# EAGLE library part RASPBERRY-PI+ (library HansAva)
Samtec SSW-120-01-T-D
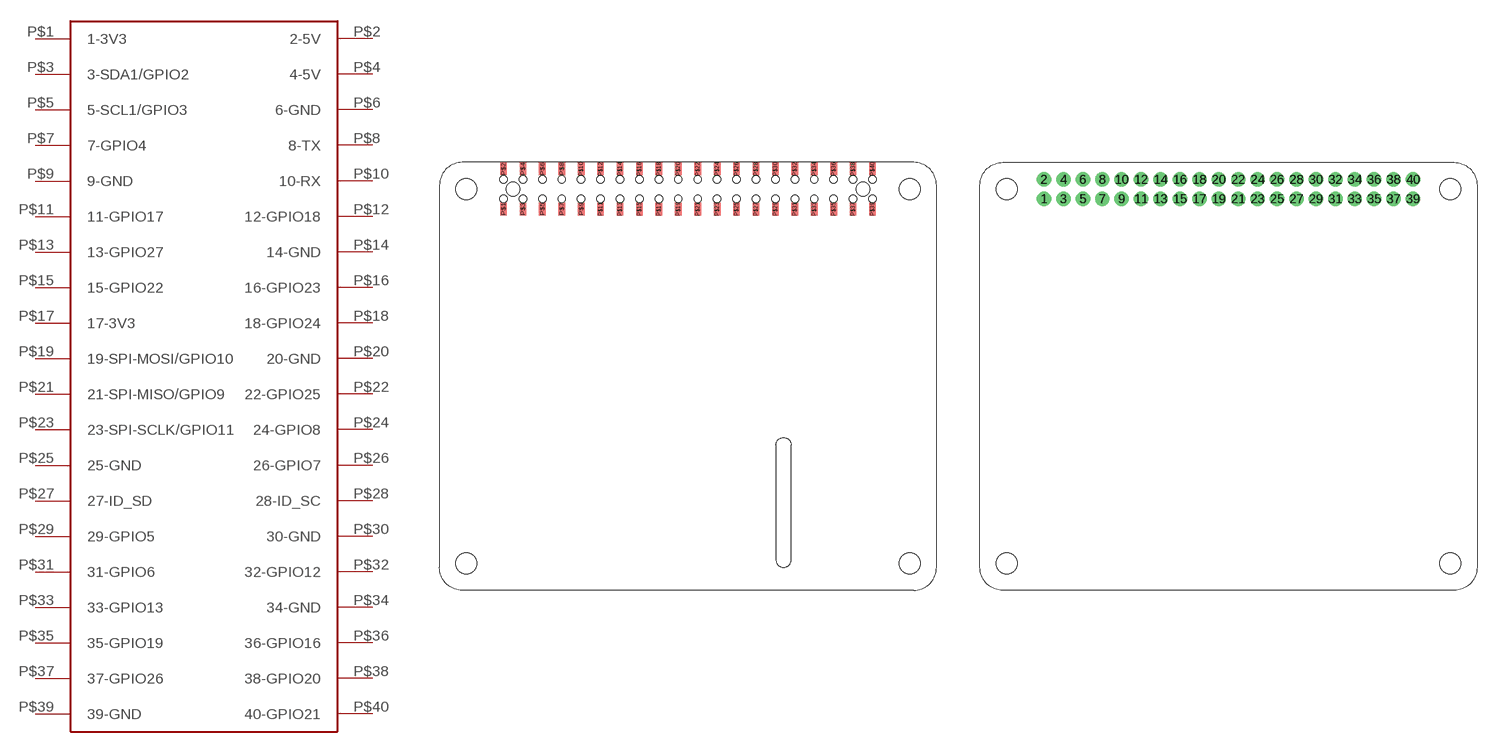
[diagram p40: symbol with the pads of RASPBERRY-PI-PLUS-CAM_NOTCH; footprints RASPBERRY-PI-PLUS-CAM_NOTCH, RASPBERRY-PI-PLUS]

Designator prefix -

## RASPBERRY-PI+  [RASPBERRY-PI-PLUS-CAM_NOTCH]
P$1  1-3V3
P$2  2-5V
P$3  3-SDA1/GPIO2
P$4  4-5V
P$5  5-SCL1/GPIO3
P$6  6-GND
P$7  7-GPIO4
P$8  8-TX
P$9  9-GND
P$10  10-RX
P$11  11-GPIO17
P$12  12-GPIO18
P$13  13-GPIO27
P$14  14-GND
P$15  15-GPIO22
P$16  16-GPIO23
P$17  17-3V3
P$18  18-GPIO24
P$19  19-SPI-MOSI/GPIO10
P$20  20-GND
P$21  21-SPI-MISO/GPIO9
P$22  22-GPIO25
P$23  23-SPI-SCLK/GPIO11
P$24  24-GPIO8
P$25  25-GND
P$26  26-GPIO7
P$27  27-ID_SD
P$28  28-ID_SC
P$29  29-GPIO5
P$30  30-GND
P$31  31-GPIO6
P$32  32-GPIO12
P$33  33-GPIO13
P$34  34-GND
P$35  35-GPIO19
P$36  36-GPIO16
P$37  37-GPIO26
P$38  38-GPIO20
P$39  39-GND
P$40  40-GPIO21

## RASPBERRY-PI+NONOTCHES  [RASPBERRY-PI-PLUS]
1  1-3V3
2  2-5V
3  3-SDA1/GPIO2
4  4-5V
5  5-SCL1/GPIO3
6  6-GND
7  7-GPIO4
8  8-TX
9  9-GND
10  10-RX
11  11-GPIO17
12  12-GPIO18
13  13-GPIO27
14  14-GND
15  15-GPIO22
16  16-GPIO23
17  17-3V3
18  18-GPIO24
19  19-SPI-MOSI/GPIO10
20  20-GND
21  21-SPI-MISO/GPIO9
22  22-GPIO25
23  23-SPI-SCLK/GPIO11
24  24-GPIO8
25  25-GND
26  26-GPIO7
27  27-ID_SD
28  28-ID_SC
29  29-GPIO5
30  30-GND
31  31-GPIO6
32  32-GPIO12
33  33-GPIO13
34  34-GND
35  35-GPIO19
36  36-GPIO16
37  37-GPIO26
38  38-GPIO20
39  39-GND
40  40-GPIO21

## RASPBERRY-PI+CAM/DISPLAY_NOTCH  [RASPBERRY-PI-PLUS-DISPLAY/CAM_NOTCH]
Pads as for RASPBERRY-PI-PLUS-CAM_NOTCH

## RASPBERRY-PI+RASPBERRY-PI-PLUS-NOOUTLINE  [RASPBERRY-PI-PLUS-NOOUTLINE]
Pads as for RASPBERRY-PI-PLUS

## RASPBERRY-PI+HEADERONLY  [RASPBERRY-PI-PLUS-HEADERONLY]
Pads as for RASPBERRY-PI-PLUS

## RASPBERRY-PI+PIZERO  [RASPBERRY-PI-ZERO]
Pads as for RASPBERRY-PI-PLUS

## RASPBERRY-PI+PIZERO-REFLOWHEADER  [RASPBERRY-PI-ZERO-REFLOWHEADER]
Pads as for RASPBERRY-PI-PLUS-CAM_NOTCH

## Footprint RASPBERRY-PI-PLUS-CAM_NOTCH (pad centres in mm)
For use with TOBY : REF-182684-02 2x20 SIF 10.00mm length PCB tails REF-182665-01 2x20 pos. with PCB alignment peg option REF-182683-02 2x20 SIF 4.93mm length PCB tails http://www.toby.co.uk/content/catalogue/products.aspx?series=REF-18xxxx-0x http://www.toby.co.uk/content/catalogue/products.aspx?series=REF-1826xx-0x http://www.toby.co.uk/content/catalogue/products.aspx?series=REF-18xxxx-0x
smd 0.889 x 1.68: P$1 -34.13,21.905; P$2 -34.13,27.145; P$3 -31.59,21.905; P$4 -31.59,27.145; P$5 -29.05,21.905; P$6 -29.05,27.145; P$7 -26.51,21.905; P$8 -26.51,27.145; P$9 -23.97,21.905; P$10 -23.97,27.145; P$11 -21.43,21.905; P$12 -21.43,27.145; P$13 -18.89,21.905; P$14 -18.89,27.145; P$15 -16.35,21.905; P$16 -16.35,27.145; P$17 -13.81,21.905; P$18 -13.81,27.145; P$19 -11.27,21.905; P$20 -11.27,27.145; P$21 -8.73,21.905; P$22 -8.73,27.145; P$23 -6.19,21.905; P$24 -6.19,27.145; P$25 -3.65,21.905; P$26 -3.65,27.145; P$27 -1.11,21.905; P$28 -1.11,27.145; P$29 1.43,21.905; P$30 1.43,27.145; P$31 3.97,21.905; P$32 3.97,27.145; P$33 6.51,21.905; P$34 6.51,27.145; P$35 9.05,21.905; P$36 9.05,27.145; P$37 11.59,21.905; P$38 11.59,27.145; P$39 14.13,21.905; P$40 14.13,27.145
hole 2.75 at -39,24.5
hole 2.75 at 19,24.5
hole 2.75 at -39,-24.5
hole 2.75 at 19,-24.5
hole 1.78 at -32.86,24.5
hole 1.78 at 12.86,24.5
hole 0.97 at -34.13,25.77
hole 0.97 at -31.59,25.77
hole 0.97 at -29.05,25.77
hole 0.97 at -26.51,25.77
hole 0.97 at -23.97,25.77
hole 0.97 at -21.43,25.77
hole 0.97 at -18.89,25.77
hole 0.97 at -16.35,25.77
hole 0.97 at -13.81,25.77
hole 0.97 at -11.27,25.77
hole 0.97 at -8.73,25.77
hole 0.97 at -6.19,25.77
hole 0.97 at -3.65,25.77
hole 0.97 at -1.11,25.77
hole 0.97 at 1.43,25.77
hole 0.97 at 3.97,25.77
hole 0.97 at 6.51,25.77
hole 0.97 at 9.05,25.77
hole 0.97 at 11.59,25.77
hole 0.97 at 14.13,25.77
hole 0.97 at -34.13,23.23
hole 0.97 at -31.59,23.23
hole 0.97 at -29.05,23.23
hole 0.97 at -26.51,23.23
hole 0.97 at -23.97,23.23
hole 0.97 at -21.43,23.23
hole 0.97 at -18.89,23.23
hole 0.97 at -16.35,23.23
hole 0.97 at -13.81,23.23
hole 0.97 at -11.27,23.23
hole 0.97 at -8.73,23.23
hole 0.97 at -6.19,23.23
hole 0.97 at -3.65,23.23
hole 0.97 at -1.11,23.23
hole 0.97 at 1.43,23.23
hole 0.97 at 3.97,23.23
hole 0.97 at 6.51,23.23
hole 0.97 at 9.05,23.23
hole 0.97 at 11.59,23.23
hole 0.97 at 14.13,23.23

## Footprint RASPBERRY-PI-PLUS (pad centres in mm)
drill 0.97 pad 1.88: 1 -34.13,23.23; 2 -34.13,25.77; 3 -31.59,23.23; 4 -31.59,25.77; 5 -29.05,23.23; 6 -29.05,25.77; 7 -26.51,23.23; 8 -26.51,25.77; 9 -23.97,23.23; 10 -23.97,25.77; 11 -21.43,23.23; 12 -21.43,25.77; 13 -18.89,23.23; 14 -18.89,25.77; 15 -16.35,23.23; 16 -16.35,25.77; 17 -13.81,23.23; 18 -13.81,25.77; 19 -11.27,23.23; 20 -11.27,25.77; 21 -8.73,23.23; 22 -8.73,25.77; 23 -6.19,23.23; 24 -6.19,25.77; 25 -3.65,23.23; 26 -3.65,25.77; 27 -1.11,23.23; 28 -1.11,25.77; 29 1.43,23.23; 30 1.43,25.77; 31 3.97,23.23; 32 3.98,25.77; 33 6.51,23.23; 34 6.51,25.77; 35 9.05,23.23; 36 9.05,25.77; 37 11.59,23.23; 38 11.59,25.77; 39 14.13,23.23; 40 14.13,25.77
hole 2.75 at -39,24.5
hole 2.75 at 19,24.5
hole 2.75 at -39,-24.5
hole 2.75 at 19,-24.5

## Footprint RASPBERRY-PI-PLUS-DISPLAY/CAM_NOTCH (pad centres in mm)
smd 0.889 x 1.68: P$1 -34.13,21.905; P$2 -34.13,27.145; P$3 -31.59,21.905; P$4 -31.59,27.145; P$5 -29.05,21.905; P$6 -29.05,27.145; P$7 -26.51,21.905; P$8 -26.51,27.145; P$9 -23.97,21.905; P$10 -23.97,27.145; P$11 -21.43,21.905; P$12 -21.43,27.145; P$13 -18.89,21.905; P$14 -18.89,27.145; P$15 -16.35,21.905; P$16 -16.35,27.145; P$17 -13.81,21.905; P$18 -13.81,27.145; P$19 -11.27,21.905; P$20 -11.27,27.145; P$21 -8.73,21.905; P$22 -8.73,27.145; P$23 -6.19,21.905; P$24 -6.19,27.145; P$25 -3.65,21.905; P$26 -3.65,27.145; P$27 -1.11,21.905; P$28 -1.11,27.145; P$29 1.43,21.905; P$30 1.43,27.145; P$31 3.97,21.905; P$32 3.97,27.145; P$33 6.51,21.905; P$34 6.51,27.145; P$35 9.05,21.905; P$36 9.05,27.145; P$37 11.59,21.905; P$38 11.59,27.145; P$39 14.13,21.905; P$40 14.13,27.145
hole 2.75 at -39,24.5
hole 2.75 at 19,24.5
hole 2.75 at -39,-24.5
hole 2.75 at 19,-24.5
hole 1.78 at -32.86,24.5
hole 1.78 at 12.86,24.5
hole 0.97 at -34.13,25.77
hole 0.97 at -31.59,25.77
hole 0.97 at -29.05,25.77
hole 0.97 at -26.51,25.77
hole 0.97 at -23.97,25.77
hole 0.97 at -21.43,25.77
hole 0.97 at -18.89,25.77
hole 0.97 at -16.35,25.77
hole 0.97 at -13.81,25.77
hole 0.97 at -11.27,25.77
hole 0.97 at -8.73,25.77
hole 0.97 at -6.19,25.77
hole 0.97 at -3.65,25.77
hole 0.97 at -1.11,25.77
hole 0.97 at 1.43,25.77
hole 0.97 at 3.97,25.77
hole 0.97 at 6.51,25.77
hole 0.97 at 9.05,25.77
hole 0.97 at 11.59,25.77
hole 0.97 at 14.13,25.77
hole 0.97 at -34.13,23.23
hole 0.97 at -31.59,23.23
hole 0.97 at -29.05,23.23
hole 0.97 at -26.51,23.23
hole 0.97 at -23.97,23.23
hole 0.97 at -21.43,23.23
hole 0.97 at -18.89,23.23
hole 0.97 at -16.35,23.23
hole 0.97 at -13.81,23.23
hole 0.97 at -11.27,23.23
hole 0.97 at -8.73,23.23
hole 0.97 at -6.19,23.23
hole 0.97 at -3.65,23.23
hole 0.97 at -1.11,23.23
hole 0.97 at 1.43,23.23
hole 0.97 at 3.97,23.23
hole 0.97 at 6.51,23.23
hole 0.97 at 9.05,23.23
hole 0.97 at 11.59,23.23
hole 0.97 at 14.13,23.23

## Footprint RASPBERRY-PI-PLUS-NOOUTLINE (pad centres in mm)
drill 0.97 pad 1.88: 1 -23.97,24.5; 2 -23.97,27.04; 3 -21.43,24.5; 4 -21.43,27.04; 5 -18.89,24.5; 6 -18.89,27.04; 7 -16.35,24.5; 8 -16.35,27.04; 9 -13.81,24.5; 10 -13.81,27.04; 11 -11.27,24.5; 12 -11.27,27.04; 13 -8.73,24.5; 14 -8.73,27.04; 15 -6.19,24.5; 16 -6.19,27.04; 17 -3.65,24.5; 18 -3.65,27.04; 19 -1.11,24.5; 20 -1.11,27.04; 21 1.43,24.5; 22 1.43,27.04; 23 3.97,24.5; 24 3.97,27.04; 25 6.51,24.5; 26 6.51,27.04; 27 9.05,24.5; 28 9.05,27.04; 29 11.59,24.5; 30 11.59,27.04; 31 14.13,24.5; 32 14.14,27.04; 33 16.67,24.5; 34 16.67,27.04; 35 19.21,24.5; 36 19.21,27.04; 37 21.75,24.5; 38 21.75,27.04; 39 24.29,24.5; 40 24.29,27.04
hole 2.75 at -28.84,25.77
hole 2.75 at 29.16,25.77
hole 2.75 at -28.84,-23.23
hole 2.75 at 29.16,-23.23

## Footprint RASPBERRY-PI-PLUS-HEADERONLY (pad centres in mm)
drill 0.97 pad 1.88: 1 -23.97,-1.218; 2 -23.97,1.323; 3 -21.43,-1.218; 4 -21.43,1.323; 5 -18.89,-1.218; 6 -18.89,1.323; 7 -16.35,-1.218; 8 -16.35,1.323; 9 -13.81,-1.218; 10 -13.81,1.323; 11 -11.27,-1.218; 12 -11.27,1.323; 13 -8.73,-1.218; 14 -8.73,1.323; 15 -6.19,-1.218; 16 -6.19,1.323; 17 -3.65,-1.218; 18 -3.65,1.323; 19 -1.11,-1.218; 20 -1.11,1.323; 21 1.43,-1.218; 22 1.43,1.323; 23 3.97,-1.218; 24 3.97,1.323; 25 6.51,-1.218; 26 6.51,1.323; 27 9.05,-1.218; 28 9.05,1.323; 29 11.59,-1.218; 30 11.59,1.323; 31 14.13,-1.218; 32 14.14,1.323; 33 16.67,-1.218; 34 16.67,1.323; 35 19.21,-1.218; 36 19.21,1.323; 37 21.75,-1.218; 38 21.75,1.323; 39 24.29,-1.218; 40 24.29,1.323

## Footprint RASPBERRY-PI-ZERO (pad centres in mm)
drill 0.97 pad 1.88: 1 -23.97,23.23; 2 -23.97,25.77; 3 -21.43,23.23; 4 -21.43,25.77; 5 -18.89,23.23; 6 -18.89,25.77; 7 -16.35,23.23; 8 -16.35,25.77; 9 -13.81,23.23; 10 -13.81,25.77; 11 -11.27,23.23; 12 -11.27,25.77; 13 -8.73,23.23; 14 -8.73,25.77; 15 -6.19,23.23; 16 -6.19,25.77; 17 -3.65,23.23; 18 -3.65,25.77; 19 -1.11,23.23; 20 -1.11,25.77; 21 1.43,23.23; 22 1.43,25.77; 23 3.97,23.23; 24 3.97,25.77; 25 6.51,23.23; 26 6.51,25.77; 27 9.05,23.23; 28 9.05,25.77; 29 11.59,23.23; 30 11.59,25.77; 31 14.13,23.23; 32 14.14,25.77; 33 16.67,23.23; 34 16.67,25.77; 35 19.21,23.23; 36 19.21,25.77; 37 21.75,23.23; 38 21.75,25.77; 39 24.29,23.23; 40 24.29,25.77
hole 2.75 at -28.84,24.5
hole 2.75 at 29.16,24.5
hole 2.75 at -28.84,1.5
hole 2.75 at 29.16,1.5

## Footprint RASPBERRY-PI-ZERO-REFLOWHEADER (pad centres in mm)
smd 0.889 x 1.68: P$1 -23.97,7.935; P$2 -23.97,13.175; P$3 -21.43,7.935; P$4 -21.43,13.175; P$5 -18.89,7.935; P$6 -18.89,13.175; P$7 -16.35,7.935; P$8 -16.35,13.175; P$9 -13.81,7.935; P$10 -13.81,13.175; P$11 -11.27,7.935; P$12 -11.27,13.175; P$13 -8.73,7.935; P$14 -8.73,13.175; P$15 -6.19,7.935; P$16 -6.19,13.175; P$17 -3.65,7.935; P$18 -3.65,13.175; P$19 -1.11,7.935; P$20 -1.11,13.175; P$21 1.43,7.935; P$22 1.43,13.175; P$23 3.97,7.935; P$24 3.97,13.175; P$25 6.51,7.935; P$26 6.51,13.175; P$27 9.05,7.935; P$28 9.05,13.175; P$29 11.59,7.935; P$30 11.59,13.175; P$31 14.13,7.935; P$32 14.13,13.175; P$33 16.67,7.935; P$34 16.67,13.175; P$35 19.21,7.935; P$36 19.21,13.175; P$37 21.75,7.935; P$38 21.75,13.175; P$39 24.29,7.935; P$40 24.29,13.175
hole 2.75 at -28.84,10.53
hole 2.75 at 29.16,10.53
hole 2.75 at -28.84,-12.47
hole 2.75 at 29.16,-12.47
hole 1.78 at -22.7,10.53
hole 1.78 at 23.02,10.53
hole 0.97 at -23.97,11.8
hole 0.97 at -21.43,11.8
hole 0.97 at -18.89,11.8
hole 0.97 at -16.35,11.8
hole 0.97 at -13.81,11.8
hole 0.97 at -11.27,11.8
hole 0.97 at -8.73,11.8
hole 0.97 at -6.19,11.8
hole 0.97 at -3.65,11.8
hole 0.97 at -1.11,11.8
hole 0.97 at 1.43,11.8
hole 0.97 at 3.97,11.8
hole 0.97 at 6.51,11.8
hole 0.97 at 9.05,11.8
hole 0.97 at 11.59,11.8
hole 0.97 at 14.13,11.8
hole 0.97 at 16.67,11.8
hole 0.97 at 19.21,11.8
hole 0.97 at 21.75,11.8
hole 0.97 at 24.29,11.8
hole 0.97 at -23.97,9.26
hole 0.97 at -21.43,9.26
hole 0.97 at -18.89,9.26
hole 0.97 at -16.35,9.26
hole 0.97 at -13.81,9.26
hole 0.97 at -11.27,9.26
hole 0.97 at -8.73,9.26
hole 0.97 at -6.19,9.26
hole 0.97 at -3.65,9.26
hole 0.97 at -1.11,9.26
hole 0.97 at 1.43,9.26
hole 0.97 at 3.97,9.26
hole 0.97 at 6.51,9.26
hole 0.97 at 9.05,9.26
hole 0.97 at 11.59,9.26
hole 0.97 at 14.13,9.26
hole 0.97 at 16.67,9.26
hole 0.97 at 19.21,9.26
hole 0.97 at 21.75,9.26
hole 0.97 at 24.29,9.26